# EAGLE library part ATTINY412 (library madhu)
AVR ATtiny412 1 series microcontroller
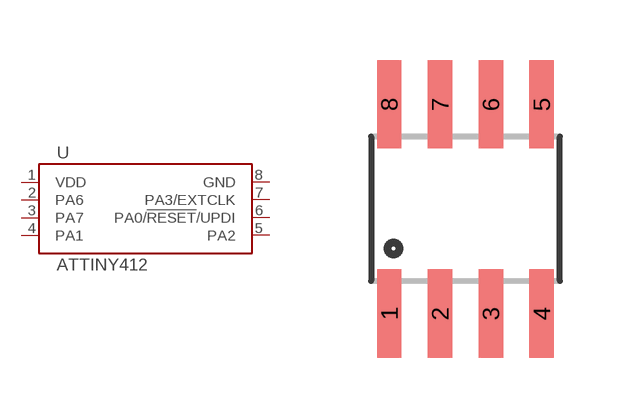
[diagram p44: symbol with the pads of SOIC-8; footprint SOIC-8]

Designator prefix U

## ATTINY412  [SOIC-8]
1  VDD  pwr
2  PA6
3  PA7
4  PA1
5  PA2
6  PA0/!RESET!/UPDI
7  PA3/EXTCLK
8  GND  pwr

## Footprint SOIC-8 (pad centres in mm)
Small Outline Package Fits JEDEC packages (narrow SOIC-8)
smd 0.61 x 2.21: 1 -1.905,-2.616; 2 -0.635,-2.616; 3 0.635,-2.616; 4 1.905,-2.616; 5 1.905,2.616; 6 0.635,2.616; 7 -0.635,2.616; 8 -1.905,2.616